# Altium footprint library WR-TBL_Pluggable Connector_3.81mm.PcbLib: 201 footprints (part 1 of 13)
Each footprint in its own frame and in the unit in brackets; x right, y up, seen from the top. Pads: shape width x height; smd on the part's side, far side on the other; paste and mask are expansions set on the pad; w line width, h text height; cw(c..) or ccw(c..) is an arc to the next point about the centre after c.
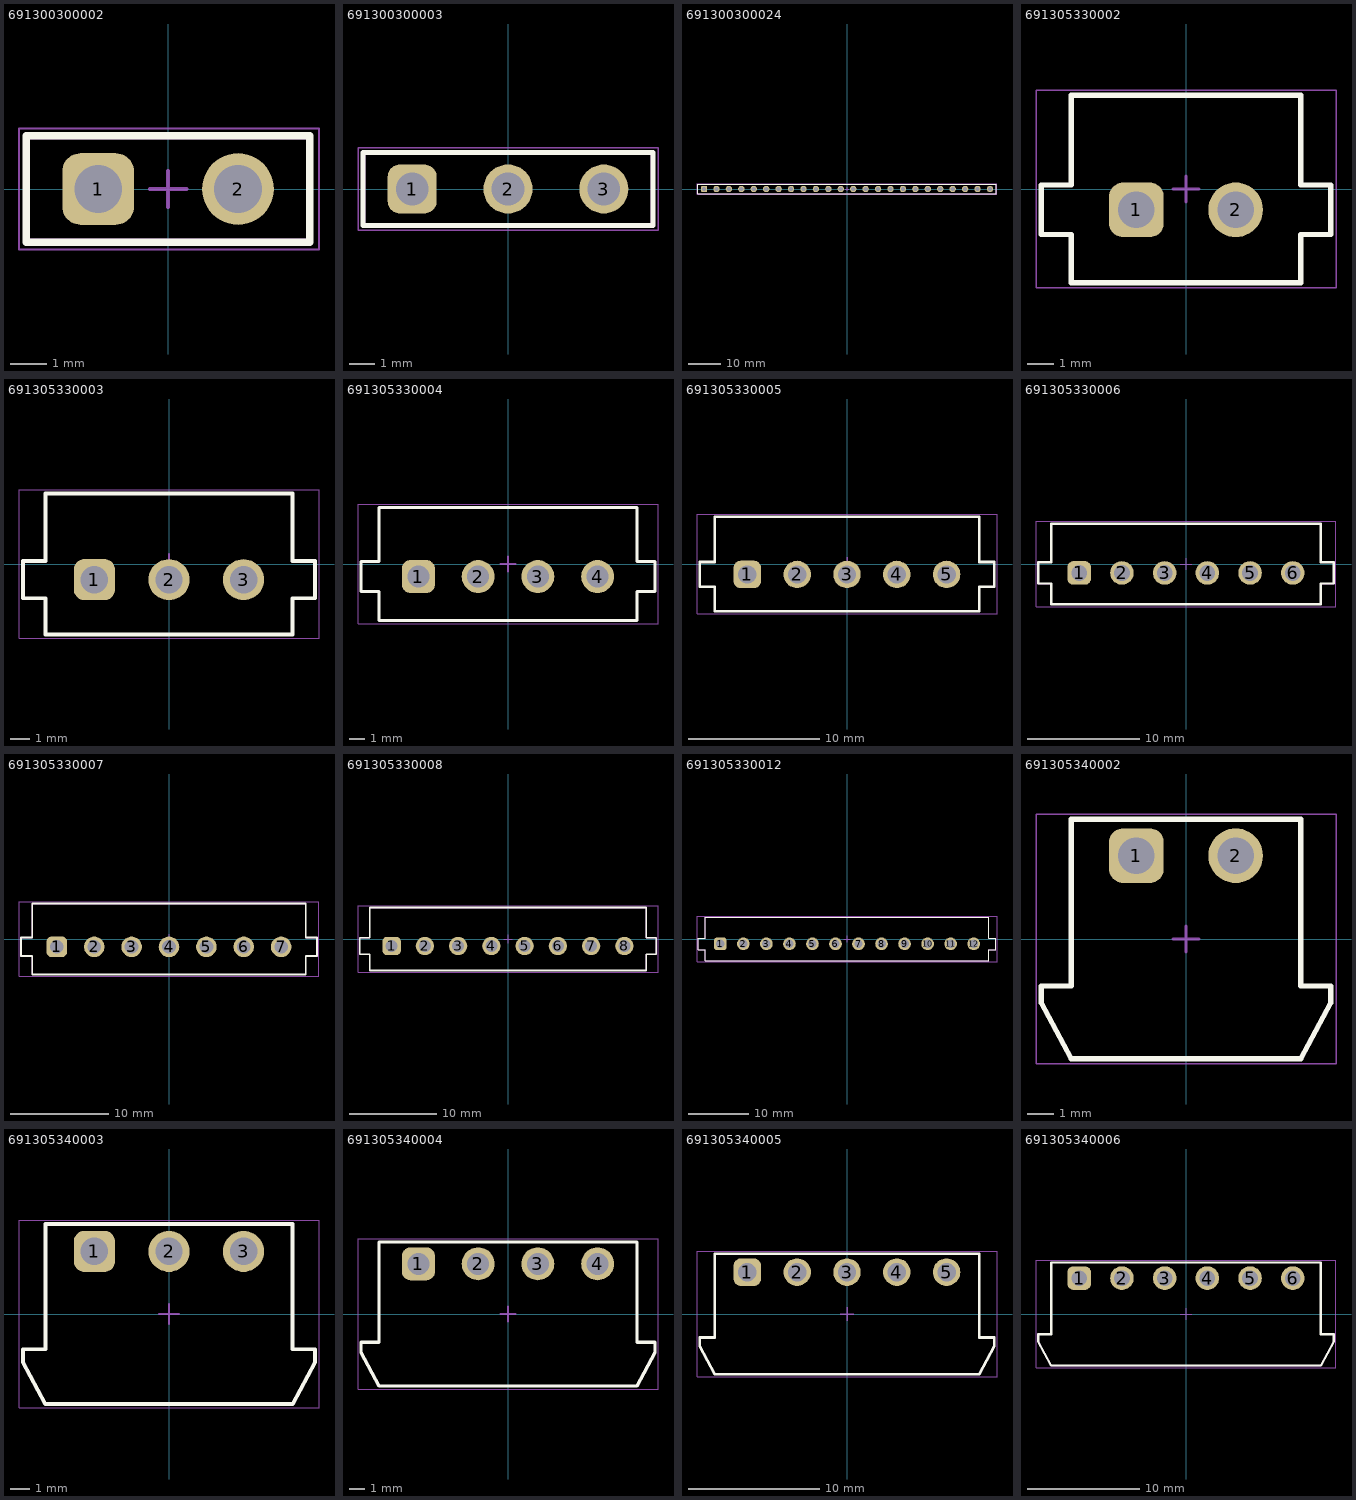
[diagram p0: the footprints below, top view; thin cyan lines are the x and y axes]

## 691300300002 [mm] "Series 3003 - 3.81mm Pin Header, 02p"
height 10.5
pads (2):
  rrect50% 1.95x1.95 hole 1.3: 1(-1.905,0)
  round 1.95 hole 1.3: 2(1.905,0)
Top Overlay:
  lines w0.2: -3.86,-1.45 3.86,-1.45 3.86,1.45 -3.86,1.45 -3.86,-1.45
Top Assembly:
  lines w0.1: -3.81,-1.4 -3.81,1.4 3.81,1.4 3.81,-1.4 -3.81,-1.4
Top Designator:
  text ".Designator" at -3.647,-0.357 h1
Top 3D Body:
  lines w0.1: -3.81,-1.4 -3.81,1.4 3.81,1.4 3.81,-1.4 -3.81,-1.4
Top Courtyard:
  lines w0.05: -4.06,-1.65 4.11,-1.65 4.11,1.65 -4.06,1.65 -4.06,-1.65
Top Component Center:
  lines w0.1: -0.5,0 0.5,0 ; 0,-0.5 0,0.5
3D body "691300300002.stp": height 9.02, standoff -3.48, extent -3.81,-1.4 3.81,1.4

## 691300300003 [mm] "Series 3003 - 3.81mm Pin Header, 03p"
height 10.5
pads (3):
  rrect50% 1.95x1.95 hole 1.3: 1(-3.81,0)
  round 1.95 hole 1.3: 2(0,0) 3(3.81,0)
Top Overlay:
  lines w0.2: -5.765,-1.45 5.765,-1.45 5.765,1.45 -5.765,1.45 -5.765,-1.45
Top Assembly:
  lines w0.1: -5.715,-1.4 -5.715,1.4 5.715,1.4 5.715,-1.4 -5.715,-1.4
Top Designator:
  text ".Designator" at -3.647,-0.357 h1
Top 3D Body:
  lines w0.1: -5.715,-1.4 -5.715,1.4 5.715,1.4 5.715,-1.4 -5.715,-1.4
Top Courtyard:
  lines w0.05: -5.965,-1.65 5.965,-1.65 5.965,1.65 -5.965,1.65 -5.965,-1.65
Top Component Center:
  lines w0.1: -0.5,0 0.5,0 ; 0,-0.5 0,0.5
3D body "691300300003.stp": height 9.02, standoff -3.48, extent -5.715,-1.4 5.715,1.4

## 691300300024 [mm] "Series 3003 - 3.81mm Pin Header, 24p"
height 10.5
pads (24):
  rrect50% 1.95x1.95 hole 1.3: 1(-43.815,0)
  round 1.95 hole 1.3: 2(-40.005,0) 3(-36.195,0) 4(-32.385,0) 5(-28.575,0) 6(-24.765,0) 7(-20.955,0) 8(-17.145,0) 9(-13.335,0) 10(-9.525,0) 11(-5.715,0) 12(-1.905,0) 13(1.905,0) 14(5.715,0) 15(9.525,0) 16(13.335,0) 17(17.145,0) 18(20.955,0) 19(24.765,0) 20(28.575,0) 21(32.385,0) 22(36.195,0) 23(40.005,0) 24(43.815,0)
Top Overlay:
  lines w0.2: -45.77,-1.45 45.77,-1.45 45.77,1.45 -45.77,1.45 -45.77,-1.45
Top Assembly:
  lines w0.1: -45.72,-1.4 -45.72,1.4 45.72,1.4 45.72,-1.4 -45.72,-1.4
Top Designator:
  text ".Designator" at -3.647,-0.357 h1
Top 3D Body:
  lines w0.1: -45.72,-1.4 -45.72,1.4 45.72,1.4 45.72,-1.4 -45.72,-1.4
Top Courtyard:
  lines w0.05: -45.97,-1.65 45.97,-1.65 45.97,1.65 -45.97,1.65 -45.97,-1.65
Top Component Center:
  lines w0.1: -0.5,0 0.5,0 ; 0,-0.5 0,0.5
3D body "691300300024.stp": height 9.02, standoff -3.48, extent -45.72,-1.4 45.72,1.4

## 691305330002 [mm] "Vertical PCB Header with Plastic Latch, pitch 3.81mm, 02p"
height 9.2
pads (2):
  rrect50% 2.1x2.1 hole 1.4: 1(-1.905,-0.8)
  round 2.1 hole 1.4: 2(1.905,-0.8)
Top Overlay:
  lines w0.2: -5.56,-1.75 -5.56,0.15 -4.41,0.15 -4.41,3.6 4.41,3.6 4.41,0.15 5.56,0.15 5.56,-1.75 4.41,-1.75 4.41,-3.6 -4.41,-3.6 -4.41,-1.75 -5.56,-1.75
Top Assembly:
  lines w0.1: -5.56,-1.75 -4.41,-1.75 -4.41,-3.6 4.41,-3.6 4.41,-1.75 5.56,-1.75 5.56,0.15 4.41,0.15 4.41,3.6 -4.41,3.6 -4.41,0.15 -5.56,0.15 -5.56,-1.75
Top Designator:
  text ".Designator" at -3.647,-0.357 h1
Top 3D Body:
  lines w0.1: -5.56,-1.75 -5.56,0.15 -4.41,0.15 -4.41,3.6 4.41,3.6 4.41,0.15 5.56,0.15 5.56,-1.75 4.41,-1.75 4.41,-3.6 -4.41,-3.6 -4.41,-1.75 -5.56,-1.75
Top Courtyard:
  lines w0.05: -5.76,-3.8 -5.76,3.8 5.76,3.8 5.76,-3.8 -5.76,-3.8
Top Component Center:
  lines w0.1: -0.5,0 0.5,0 ; 0,-0.5 0,0.5
3D body "691305330002.stp": height 9.25, standoff -3.45, extent -5.605,-3.6 5.505,3.6

## 691305330003 [mm] "Vertical PCB Header with Plastic Latch, pitch 3.81mm, 03p"
height 9.2
pads (3):
  rrect50% 2.1x2.1 hole 1.4: 1(-3.81,-0.8)
  round 2.1 hole 1.4: 2(0,-0.8) 3(3.81,-0.8)
Top Overlay:
  lines w0.2: -7.465,-1.75 -6.315,-1.75 -6.315,-3.6 6.315,-3.6 6.315,-1.75 7.465,-1.75 7.465,0.15 6.315,0.15 6.315,3.6 -6.315,3.6 -6.315,0.15 -7.465,0.15 -7.465,-1.75
Top Assembly:
  lines w0.1: -7.465,-1.75 -7.465,0.15 -6.315,0.15 -6.315,3.6 6.315,3.6 6.315,0.15 7.465,0.15 7.465,-1.75 6.315,-1.75 6.315,-3.6 -6.315,-3.6 -6.315,-1.75 -7.465,-1.75
Top Designator:
  text ".Designator" at -3.647,-0.357 h1
Top 3D Body:
  lines w0.1: -7.465,-1.75 -6.315,-1.75 -6.315,-3.6 6.315,-3.6 6.315,-1.75 7.465,-1.75 7.465,0.15 6.315,0.15 6.315,3.6 -6.315,3.6 -6.315,0.15 -7.465,0.15 -7.465,-1.75
Top Courtyard:
  lines w0.05: -7.665,-3.8 7.665,-3.8 7.665,3.8 -7.665,3.8 -7.665,-3.8
Top Component Center:
  lines w0.1: -0.5,0 0.5,0 ; 0,-0.5 0,0.5
3D body "691305330003.stp": height 9.25, standoff -3.45, extent -7.46,-3.6 7.46,3.6

## 691305330004 [mm] "Vertical PCB Header with Plastic Latch, pitch 3.81mm, 04p"
height 9.2
pads (4):
  rrect50% 2.1x2.1 hole 1.4: 1(-5.715,-0.8)
  round 2.1 hole 1.4: 2(-1.905,-0.8) 3(1.905,-0.8) 4(5.715,-0.8)
Top Overlay:
  lines w0.2: -9.37,-1.75 -8.22,-1.75 -8.22,-3.6 8.22,-3.6 8.22,-1.75 9.37,-1.75 9.37,0.15 8.22,0.15 8.22,3.6 -8.22,3.6 -8.22,0.15 -9.37,0.15 -9.37,-1.75
Top Assembly:
  lines w0.1: -9.37,-1.75 -9.37,0.15 -8.22,0.15 -8.22,3.6 8.22,3.6 8.22,0.15 9.37,0.15 9.37,-1.75 8.22,-1.75 8.22,-3.6 -8.22,-3.6 -8.22,-1.75 -9.37,-1.75
Top Designator:
  text ".Designator" at -3.647,-0.357 h1
Top 3D Body:
  lines w0.1: -9.37,-1.75 -8.22,-1.75 -8.22,-3.6 8.22,-3.6 8.22,-1.75 9.37,-1.75 9.37,0.15 8.22,0.15 8.22,3.6 -8.22,3.6 -8.22,0.15 -9.37,0.15 -9.37,-1.75
Top Courtyard:
  lines w0.05: -9.57,-3.8 9.57,-3.8 9.57,3.8 -9.57,3.8 -9.57,-3.8
Top Component Center:
  lines w0.1: -0.5,0 0.5,0 ; 0,-0.5 0,0.5
3D body "691305330004.stp": height 9.25, standoff -3.45, extent -9.365,-3.6 9.365,3.6

## 691305330005 [mm] "Vertical PCB Header with Plastic Latch, pitch 3.81mm, 05p"
height 9.2
pads (5):
  rrect50% 2.1x2.1 hole 1.4: 1(-7.62,-0.8)
  round 2.1 hole 1.4: 2(-3.81,-0.8) 3(0,-0.8) 4(3.81,-0.8) 5(7.62,-0.8)
Top Overlay:
  lines w0.2: -11.275,-1.75 -11.275,0.15 -10.125,0.15 -10.125,3.6 10.125,3.6 10.125,0.15 11.275,0.15 11.275,-1.75 10.125,-1.75 10.125,-3.6 -10.125,-3.6 -10.125,-1.75 -11.275,-1.75
Top Assembly:
  lines w0.1: -11.275,-1.75 -10.125,-1.75 -10.125,-3.6 10.125,-3.6 10.125,-1.75 11.275,-1.75 11.275,0.15 10.125,0.15 10.125,3.6 -10.125,3.6 -10.125,0.15 -11.275,0.15 -11.275,-1.75
Top Designator:
  text ".Designator" at -3.647,-0.357 h1
Top 3D Body:
  lines w0.1: -11.275,-1.75 -11.275,0.15 -10.125,0.15 -10.125,3.6 10.125,3.6 10.125,0.15 11.275,0.15 11.275,-1.75 10.125,-1.75 10.125,-3.6 -10.125,-3.6 -10.125,-1.75 -11.275,-1.75
Top Courtyard:
  lines w0.05: -11.475,-3.8 -11.475,3.8 11.475,3.8 11.475,-3.8 -11.475,-3.8
Top Component Center:
  lines w0.1: -0.5,0 0.5,0 ; 0,-0.5 0,0.5
3D body "691305330005.stp": height 9.25, standoff -3.45, extent -11.27,-3.6 11.27,3.6

## 691305330006 [mm] "Vertical PCB Header with Plastic Latch, pitch 3.81mm, 06p"
height 9.2
pads (6):
  rrect50% 2.1x2.1 hole 1.4: 1(-9.525,-0.8)
  round 2.1 hole 1.4: 2(-5.715,-0.8) 3(-1.905,-0.8) 4(1.905,-0.8) 5(5.715,-0.8) 6(9.525,-0.8)
Top Overlay:
  lines w0.2: -13.18,-1.75 -13.18,0.15 -12.03,0.15 -12.03,3.6 12.03,3.6 12.03,0.15 13.18,0.15 13.18,-1.75 12.03,-1.75 12.03,-3.6 -12.03,-3.6 -12.03,-1.75 -13.18,-1.75
Top Assembly:
  lines w0.1: -13.18,-1.75 -12.03,-1.75 -12.03,-3.6 12.03,-3.6 12.03,-1.75 13.18,-1.75 13.18,0.15 12.03,0.15 12.03,3.6 -12.03,3.6 -12.03,0.15 -13.18,0.15 -13.18,-1.75
Top Designator:
  text ".Designator" at -3.647,-0.357 h1
Top 3D Body:
  lines w0.1: -13.18,-1.75 -13.18,0.15 -12.03,0.15 -12.03,3.6 12.03,3.6 12.03,0.15 13.18,0.15 13.18,-1.75 12.03,-1.75 12.03,-3.6 -12.03,-3.6 -12.03,-1.75 -13.18,-1.75
Top Courtyard:
  lines w0.05: -13.38,-3.8 -13.38,3.8 13.38,3.8 13.38,-3.8 -13.38,-3.8
Top Component Center:
  lines w0.1: -0.5,0 0.5,0 ; 0,-0.5 0,0.5
3D body "691305330006.stp": height 9.25, standoff -3.45, extent -13.175,-3.6 13.175,3.6

## 691305330007 [mm] "Vertical PCB Header with Plastic Latch, pitch 3.81mm, 07p"
height 9.2
pads (7):
  rrect50% 2.1x2.1 hole 1.4: 1(-11.43,-0.8)
  round 2.1 hole 1.4: 2(-7.62,-0.8) 3(-3.81,-0.8) 4(0,-0.8) 5(3.81,-0.8) 6(7.62,-0.8) 7(11.43,-0.8)
Top Overlay:
  lines w0.2: -15.085,-1.75 -13.935,-1.75 -13.935,-3.6 13.935,-3.6 13.935,-1.75 15.085,-1.75 15.085,0.15 13.935,0.15 13.935,3.6 -13.935,3.6 -13.935,0.15 -15.085,0.15 -15.085,-1.75
Top Assembly:
  lines w0.1: -15.085,-1.75 -15.085,0.15 -13.935,0.15 -13.935,3.6 13.935,3.6 13.935,0.15 15.085,0.15 15.085,-1.75 13.935,-1.75 13.935,-3.6 -13.935,-3.6 -13.935,-1.75 -15.085,-1.75
Top Designator:
  text ".Designator" at -3.647,-0.357 h1
Top 3D Body:
  lines w0.1: -15.085,-1.75 -13.935,-1.75 -13.935,-3.6 13.935,-3.6 13.935,-1.75 15.085,-1.75 15.085,0.15 13.935,0.15 13.935,3.6 -13.935,3.6 -13.935,0.15 -15.085,0.15 -15.085,-1.75
Top Courtyard:
  lines w0.05: -15.285,-3.8 15.285,-3.8 15.285,3.8 -15.285,3.8 -15.285,-3.8
Top Component Center:
  lines w0.1: -0.5,0 0.5,0 ; 0,-0.5 0,0.5
3D body "691305330007.stp": height 9.25, standoff -3.45, extent -15.08,-3.6 15.08,3.6

## 691305330008 [mm] "Vertical PCB Header with Plastic Latch, pitch 3.81mm, 08p"
height 9.2
pads (8):
  rrect50% 2.1x2.1 hole 1.4: 1(-13.335,-0.8)
  round 2.1 hole 1.4: 2(-9.525,-0.8) 3(-5.715,-0.8) 4(-1.905,-0.8) 5(1.905,-0.8) 6(5.715,-0.8) 7(9.525,-0.8) 8(13.335,-0.8)
Top Overlay:
  lines w0.2: -16.99,-1.75 -15.84,-1.75 -15.84,-3.6 15.84,-3.6 15.84,-1.75 16.99,-1.75 16.99,0.15 15.84,0.15 15.84,3.6 -15.84,3.6 -15.84,0.15 -16.99,0.15 -16.99,-1.75
Top Assembly:
  lines w0.1: -16.99,-1.75 -16.99,0.15 -15.84,0.15 -15.84,3.6 15.84,3.6 15.84,0.15 16.99,0.15 16.99,-1.75 15.84,-1.75 15.84,-3.6 -15.84,-3.6 -15.84,-1.75 -16.99,-1.75
Top Designator:
  text ".Designator" at -3.647,-0.357 h1
Top 3D Body:
  lines w0.1: -16.99,-1.75 -15.84,-1.75 -15.84,-3.6 15.84,-3.6 15.84,-1.75 16.99,-1.75 16.99,0.15 15.84,0.15 15.84,3.6 -15.84,3.6 -15.84,0.15 -16.99,0.15 -16.99,-1.75
Top Courtyard:
  lines w0.05: -17.19,-3.8 17.19,-3.8 17.19,3.8 -17.19,3.8 -17.19,-3.8
Top Component Center:
  lines w0.1: -0.5,0 0.5,0 ; 0,-0.5 0,0.5
3D body "691305330008.stp": height 9.25, standoff -3.45, extent -16.985,-3.6 16.985,3.6

## 691305330012 [mm] "Vertical PCB Header with Plastic Latch, pitch 3.81mm, 12p"
height 9.2
pads (12):
  rrect50% 2.1x2.1 hole 1.4: 1(-20.955,-0.8)
  round 2.1 hole 1.4: 2(-17.145,-0.8) 3(-13.335,-0.8) 4(-9.525,-0.8) 5(-5.715,-0.8) 6(-1.905,-0.8) 7(1.905,-0.8) 8(5.715,-0.8) 9(9.525,-0.8) 10(13.335,-0.8) 11(17.145,-0.8) 12(20.955,-0.8)
Top Overlay:
  lines w0.2: -24.61,-1.75 -24.61,0.15 -23.46,0.15 -23.46,3.6 23.46,3.6 23.46,0.15 24.61,0.15 24.61,-1.75 23.46,-1.75 23.46,-3.6 -23.46,-3.6 -23.46,-1.75 -24.61,-1.75
Top Assembly:
  lines w0.1: -24.61,-1.75 -23.46,-1.75 -23.46,-3.6 23.46,-3.6 23.46,-1.75 24.61,-1.75 24.61,0.15 23.46,0.15 23.46,3.6 -23.46,3.6 -23.46,0.15 -24.61,0.15 -24.61,-1.75
Top Designator:
  text ".Designator" at -3.647,-0.357 h1
Top 3D Body:
  lines w0.1: -24.61,-1.75 -24.61,0.15 -23.46,0.15 -23.46,3.6 23.46,3.6 23.46,0.15 24.61,0.15 24.61,-1.75 23.46,-1.75 23.46,-3.6 -23.46,-3.6 -23.46,-1.75 -24.61,-1.75
Top Courtyard:
  lines w0.05: -24.81,-3.8 -24.81,3.8 24.81,3.8 24.81,-3.8 -24.81,-3.8
Top Component Center:
  lines w0.1: -0.5,0 0.5,0 ; 0,-0.5 0,0.5
3D body "691305330012.stp": height 9.25, standoff -3.45, extent -24.605,-3.6 24.605,3.6

## 691305340002 [mm] "Horizontal PCB Header with Plastic Latch, pitch 3.81mm, 02p"
height 7
pads (2):
  rrect50% 2.1x2.1 hole 1.4: 1(-1.905,3.2)
  round 2.1 hole 1.4: 2(1.905,3.2)
Top Overlay:
  lines w0.2: -5.562,-2.451 -4.41,-4.6 4.41,-4.6 5.562,-2.451 ; -5.56,-2.45 -5.56,-1.8 -4.41,-1.8 -4.41,4.6 4.41,4.6 4.41,-1.8 5.56,-1.8 5.56,-2.45
Top Assembly:
  lines w0.1: -5.562,-2.451 -4.41,-4.6 4.41,-4.6 5.562,-2.451 ; -5.56,-2.45 -5.56,-1.8 -4.41,-1.8 -4.41,4.6 4.41,4.6 4.41,-1.8 5.56,-1.8 5.56,-2.45
Top Designator:
  text ".Designator" at -3.647,-0.357 h1
Top 3D Body:
  lines w0.1: -5.562,-2.451 -4.41,-4.6 4.41,-4.6 5.562,-2.451 ; -5.56,-2.45 -5.56,-1.8 -4.41,-1.8 -4.41,4.6 4.41,4.6 4.41,-1.8 5.56,-1.8 5.56,-2.45
Top Courtyard:
  lines w0.05: -5.76,-4.8 -5.76,4.8 5.76,4.8 5.76,-4.8 -5.76,-4.8
Top Component Center:
  lines w0.1: -0.5,0 0.5,0 ; 0,-0.5 0,0.5
3D body "691305340002.stp": height 7.25, standoff -3.45, extent -5.605,-4.6 5.505,4.6

## 691305340003 [mm] "Horizontal PCB Header with Plastic Latch, pitch 3.81mm, 03p"
height 7
pads (3):
  rrect50% 2.1x2.1 hole 1.4: 1(-3.81,3.2)
  round 2.1 hole 1.4: 2(0,3.2) 3(3.81,3.2)
Top Overlay:
  lines w0.2: -7.467,-2.451 -6.315,-4.6 6.315,-4.6 7.467,-2.451 ; -7.465,-2.45 -7.465,-1.8 -6.315,-1.8 -6.315,4.6 6.315,4.6 6.315,-1.8 7.465,-1.8 7.465,-2.45
Top Assembly:
  lines w0.1: -7.467,-2.451 -6.315,-4.6 6.315,-4.6 7.467,-2.451 ; -7.465,-2.45 -7.465,-1.8 -6.315,-1.8 -6.315,4.6 6.315,4.6 6.315,-1.8 7.465,-1.8 7.465,-2.45
Top Designator:
  text ".Designator" at -3.647,-0.357 h1
Top 3D Body:
  lines w0.1: -7.467,-2.451 -6.315,-4.6 6.315,-4.6 7.467,-2.451 ; -7.465,-2.45 -7.465,-1.8 -6.315,-1.8 -6.315,4.6 6.315,4.6 6.315,-1.8 7.465,-1.8 7.465,-2.45
Top Courtyard:
  lines w0.05: -7.665,-4.8 7.665,-4.8 7.665,4.8 -7.665,4.8 -7.665,-4.8
Top Component Center:
  lines w0.1: -0.5,0 0.5,0 ; 0,-0.5 0,0.5
3D body "691305340003.stp": height 7.25, standoff -3.45, extent -7.46,-4.6 7.46,4.6

## 691305340004 [mm] "Horizontal PCB Header with Plastic Latch, pitch 3.81mm, 04p"
height 7
pads (4):
  rrect50% 2.1x2.1 hole 1.4: 1(-5.715,3.2)
  round 2.1 hole 1.4: 2(-1.905,3.2) 3(1.905,3.2) 4(5.715,3.2)
Top Overlay:
  lines w0.2: -9.372,-2.451 -8.22,-4.6 8.22,-4.6 9.372,-2.451 ; -9.37,-2.45 -9.37,-1.8 -8.22,-1.8 -8.22,4.6 8.22,4.6 8.22,-1.8 9.37,-1.8 9.37,-2.45
Top Assembly:
  lines w0.1: -9.372,-2.451 -8.22,-4.6 8.22,-4.6 9.372,-2.451 ; -9.37,-2.45 -9.37,-1.8 -8.22,-1.8 -8.22,4.6 8.22,4.6 8.22,-1.8 9.37,-1.8 9.37,-2.45
Top Designator:
  text ".Designator" at -3.647,-0.357 h1
Top 3D Body:
  lines w0.1: -9.372,-2.451 -8.22,-4.6 8.22,-4.6 9.372,-2.451 ; -9.37,-2.45 -9.37,-1.8 -8.22,-1.8 -8.22,4.6 8.22,4.6 8.22,-1.8 9.37,-1.8 9.37,-2.45
Top Courtyard:
  lines w0.05: -9.57,-4.8 9.57,-4.8 9.57,4.8 -9.57,4.8 -9.57,-4.8
Top Component Center:
  lines w0.1: -0.5,0 0.5,0 ; 0,-0.5 0,0.5
3D body "691305340004.stp": height 7.25, standoff -3.45, extent -9.365,-4.6 9.365,4.6

## 691305340005 [mm] "Horizontal PCB Header with Plastic Latch, pitch 3.81mm, 05p"
height 7
pads (5):
  rrect50% 2.1x2.1 hole 1.4: 1(-7.62,3.2)
  round 2.1 hole 1.4: 2(-3.81,3.2) 3(0,3.2) 4(3.81,3.2) 5(7.62,3.2)
Top Overlay:
  lines w0.2: -11.277,-2.451 -10.125,-4.6 10.125,-4.6 11.277,-2.451 ; -11.275,-2.45 -11.275,-1.8 -10.125,-1.8 -10.125,4.6 10.125,4.6 10.125,-1.8 11.275,-1.8 11.275,-2.45
Top Assembly:
  lines w0.1: -11.277,-2.451 -10.125,-4.6 10.125,-4.6 11.277,-2.451 ; -11.275,-2.45 -11.275,-1.8 -10.125,-1.8 -10.125,4.6 10.125,4.6 10.125,-1.8 11.275,-1.8 11.275,-2.45
Top Designator:
  text ".Designator" at -3.647,-0.357 h1
Top 3D Body:
  lines w0.1: -11.277,-2.451 -10.125,-4.6 10.125,-4.6 11.277,-2.451 ; -11.275,-2.45 -11.275,-1.8 -10.125,-1.8 -10.125,4.6 10.125,4.6 10.125,-1.8 11.275,-1.8 11.275,-2.45
Top Courtyard:
  lines w0.05: -11.475,-4.8 11.475,-4.8 11.475,4.8 -11.475,4.8 -11.475,-4.8
Top Component Center:
  lines w0.1: -0.5,0 0.5,0 ; 0,-0.5 0,0.5
3D body "691305340005.stp": height 7.25, standoff -3.45, extent -11.27,-4.6 11.27,4.6

## 691305340006 [mm] "Horizontal PCB Header with Plastic Latch, pitch 3.81mm, 06p"
height 7
pads (6):
  rrect50% 2.1x2.1 hole 1.4: 1(-9.525,3.2)
  round 2.1 hole 1.4: 2(-5.715,3.2) 3(-1.905,3.2) 4(1.905,3.2) 5(5.715,3.2) 6(9.525,3.2)
Top Overlay:
  lines w0.2: -13.182,-2.451 -12.03,-4.6 12.03,-4.6 13.182,-2.451 ; -13.18,-2.45 -13.18,-1.8 -12.03,-1.8 -12.03,4.6 12.03,4.6 12.03,-1.8 13.18,-1.8 13.18,-2.45
Top Assembly:
  lines w0.1: -13.182,-2.451 -12.03,-4.6 12.03,-4.6 13.182,-2.451 ; -13.18,-2.45 -13.18,-1.8 -12.03,-1.8 -12.03,4.6 12.03,4.6 12.03,-1.8 13.18,-1.8 13.18,-2.45
Top Designator:
  text ".Designator" at -3.647,-0.357 h1
Top 3D Body:
  lines w0.1: -13.182,-2.451 -12.03,-4.6 12.03,-4.6 13.182,-2.451 ; -13.18,-2.45 -13.18,-1.8 -12.03,-1.8 -12.03,4.6 12.03,4.6 12.03,-1.8 13.18,-1.8 13.18,-2.45
Top Courtyard:
  lines w0.05: -13.38,-4.8 13.38,-4.8 13.38,4.8 -13.38,4.8 -13.38,-4.8
Top Component Center:
  lines w0.1: -0.5,0 0.5,0 ; 0,-0.5 0,0.5
3D body "691305340006.stp": height 7.25, standoff -3.45, extent -13.175,-4.6 13.175,4.6